# Altium schematic symbol library MY_LIB_Modules_IEC.SchLib: 1 symbol
Pins are listed as number, name and electrical type; pins without a type are passive.

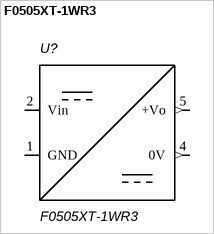
[diagram p0: symbol F0505XT-1WR3]

## F0505XT-1WR3
designator U?
MORNSUN isolated unregulated DC/DC converter, 5 V to 5 V, 1 W
pins: 1 GND (power), 2 Vin (power), 4 0V (out), 5 +Vo (out)